# Altium footprint library Amin-Library.PcbLib: 601 footprints (part 4 of 38)
Each footprint in its own frame and in the unit in brackets; x right, y up, seen from the top. Pads: shape width x height; smd on the part's side, far side on the other; paste and mask are expansions set on the pad; w line width, h text height; cw(c..) or ccw(c..) is an arc to the next point about the centre after c.
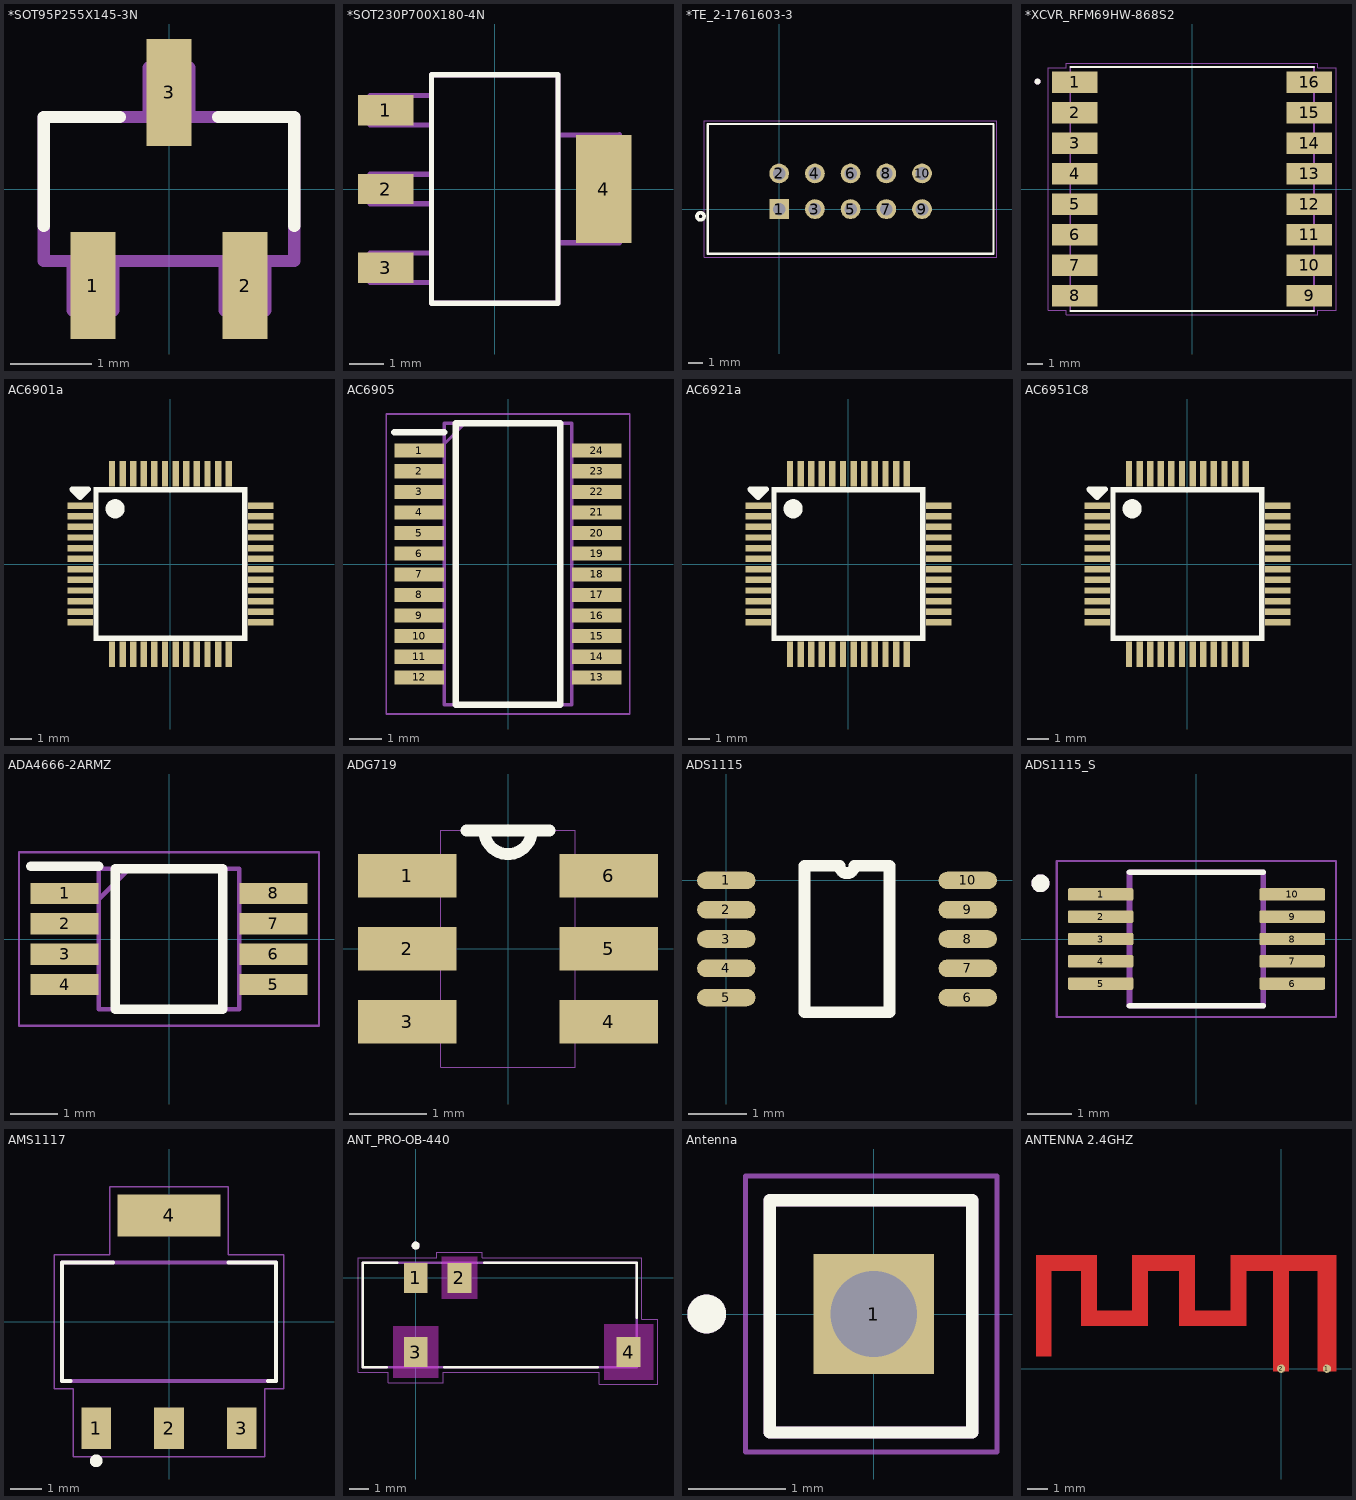
[diagram p3: the footprints below, top view; thin cyan lines are the x and y axes]

## *SOT95P255X145-3N [mil]
pads (3):
  rect 22x52 smd: 1(-37,-47) 2(37,-47) 3(0,47)
Top Overlay:
  lines w6: -61,-18 -61,35 -24,35 ; 24,35 61,35 61,-18
Mechanical 4:
  lines w6: -61,-35 -61,35 ; -61,-35 61,-35 ; -61,-35 -61,35 ; -61,-35 61,-35 ; -61,35 61,35 ; -61,35 61,35 ; -47,-59 -27,-59 ; -47,-59 -47,-35 ; -47,-59 -27,-59 ; -47,-59 -47,-35 ; -47,-35 -27,-35 ; -47,-35 -27,-35 ; -27,-59 -27,-35 ; -27,-59 -27,-35 ; -10,35 -10,59 ; -10,35 10,35 ; -10,35 -10,59 ; -10,35 10,35 ; -10,59 10,59 ; -10,59 10,59 ; 10,35 10,59 ; 10,35 10,59 ; 27,-59 47,-59 ; 27,-59 27,-35 ; 27,-59 47,-59 ; 27,-59 27,-35 ; 27,-35 47,-35 ; 27,-35 47,-35 ; 47,-59 47,-35 ; 47,-59 47,-35 ; 61,-35 61,35 ; 61,-35 61,35
3D body "CircuitWorks-SOT-23.step": height 43.81, standoff 0.5, extent -59.06,-44.21 59.06,54.21

## *SOT230P700X180-4N [mil]
pads (4):
  rect 64x35 smd: 1(-126,91) 2(-126,0) 3(-126,-91)
  rect 64x125 smd: 4(126,0)
Top Overlay:
  lines w6: -73,-132 73,-132 73,132 -73,132 -73,-132
Mechanical 4:
  lines w6: -144,-108 -144,-74 ; -144,-108 -73,-108 ; -144,-108 -144,-74 ; -144,-108 -73,-108 ; -144,-74 -73,-74 ; -144,-74 -73,-74 ; -144,-17 -144,17 ; -144,-17 -73,-17 ; -144,-17 -144,17 ; -144,-17 -73,-17 ; -144,17 -73,17 ; -144,17 -73,17 ; -144,74 -144,108 ; -144,74 -73,74 ; -144,74 -144,108 ; -144,74 -73,74 ; -144,108 -73,108 ; -144,108 -73,108 ; -73,-132 73,-132 ; -73,-132 -73,132 ; -73,-132 73,-132 ; -73,-132 -73,132 ; -73,-108 -73,-74 ; -73,-108 -73,-74 ; -73,-17 -73,17 ; -73,-17 -73,17 ; -73,74 -73,108 ; -73,74 -73,108 ; -73,132 73,132 ; -73,132 73,132 ; 73,-132 73,132 ; 73,-132 73,132 ; 73,-62 73,62 ; 73,-62 144,-62 ; 73,-62 73,62 ; 73,-62 144,-62 ; 73,62 144,63 ; 73,62 144,63 ; 144,-62 144,63 ; 144,-62 144,63
3D body "AMS1117-3.3--3DModel-STEP-56544.STEP": height 77.48, standoff 6.26, extent -127.78,-128 147.78,128

## *TE_2-1761603-3 [mm]
pads (10):
  rect 1.408x1.408 hole 0.9: 1(0,0)
  round 1.408 hole 0.9: 2(0,2.54) 3(2.54,0) 4(2.54,2.54) 5(5.08,0) 6(5.08,2.54) 7(7.62,0) 8(7.62,2.54) 9(10.16,0) 10(10.16,2.54)
Top Overlay:
  circle w0.254: c-5.588,-0.508 r0.254
  lines w0.152: -5.08,-3.175 -5.08,6.045 15.24,6.045 15.24,-3.175 -5.08,-3.175
Mechanical 16:
  lines w0.05: -5.33,-3.43 -5.33,6.295 15.49,6.295 15.49,-3.43 -5.33,-3.43

## *XCVR_RFM69HW-868S2 [mm]
pads (16):
  rect 3x1.4 smd: 1(-7.7,7) 2(-7.7,5) 3(-7.7,3) 4(-7.7,1) 5(-7.7,-1) 6(-7.7,-3) 7(-7.7,-5) 8(-7.7,-7) 9(7.7,-7) 10(7.7,-5) 11(7.7,-3) 12(7.7,-1) 13(7.7,1) 14(7.7,3) 15(7.7,5) 16(7.7,7)
Top Overlay:
  circle w0.2: c-10.15,7.05 r0.1
  lines w0.127: -8,-8 8,-8 ; -8,8 8,8
Mechanical 4:
  circle w0.2: c-10.15,7.05 r0.1
  circle w0.2: c-10.15,7.05 r0.1
  lines w0.127: -8,-8 -8,8 ; -8,-8 8,-8 ; -8,-8 -8,8 ; -8,-8 8,-8 ; -8,8 8,8 ; -8,8 8,8 ; 8,-8 8,8 ; 8,-8 8,8
Mechanical 16:
  lines w0.05: -9.45,-7.95 -8.25,-7.95 -8.25,-8.25 8.25,-8.25 8.25,-7.95 9.45,-7.95 9.45,7.95 8.25,7.95 8.25,8.25 -8.25,8.25 -8.25,7.95 -9.45,7.95 -9.45,-7.95

## AC6901a [mm]
height 5.33
pads (48):
  rect 1.2x0.3 smd mask+0.051: 1(-4.25,2.75) 2(-4.25,2.25) 3(-4.25,1.75) 4(-4.25,1.25) 5(-4.25,0.75) 6(-4.25,0.25) 7(-4.25,-0.25) 8(-4.25,-0.75) 9(-4.25,-1.25) 10(-4.25,-1.75) 11(-4.25,-2.25) 12(-4.25,-2.75) 25(4.25,-2.75) 26(4.25,-2.25) 27(4.25,-1.75) 28(4.25,-1.25) 29(4.25,-0.75) 30(4.25,-0.25) 31(4.25,0.25) 32(4.25,0.75) 33(4.25,1.25) 34(4.25,1.75) 35(4.25,2.25) 36(4.25,2.75)
  rect 0.3x1.2 smd mask+0.051: 13(-2.75,-4.25) 14(-2.25,-4.25) 15(-1.75,-4.25) 16(-1.25,-4.25) 17(-0.75,-4.25) 18(-0.25,-4.25) 19(0.25,-4.25) 20(0.75,-4.25) 21(1.25,-4.25) 22(1.75,-4.25) 23(2.25,-4.25) 24(2.75,-4.25) 37(2.75,4.25) 38(2.25,4.25) 39(1.75,4.25) 40(1.25,4.25) 41(0.75,4.25) 42(0.25,4.25) 43(-0.25,4.25) 44(-0.75,4.25) 45(-1.25,4.25) 46(-1.75,4.25) 47(-2.25,4.25) 48(-2.75,4.25)
Top Overlay:
  circle w0.6: c-2.6,2.6 r0.15
  rectangle: -3.175,3.373 3.627,3.627
  region: 3.627,2.992 3.627,3.627 3.373,3.627 3.373,2.992
  region: -3.373,-3.627 -3.373,3.627 -3.627,3.627 -3.627,-3.627
  region: -2.992,3.627 -3.627,3.627 -3.627,3.373 -2.992,3.373
  region: -3.627,-2.992 -3.627,-3.627 -3.373,-3.627 -3.373,-2.992
  region: -2.992,-3.373 -3.627,-3.373 -3.627,-3.627 -2.992,-3.627
  region: 3.373,3.373 3.373,-3.627 3.627,-3.627 3.627,3.373
  rectangle: -3.373,-3.627 3.627,-3.373
  region: -4.25,3.131 -3.869,3.512 -4.631,3.512
  lines w0.254: -3.5,-3.119 -3.5,-3.5 -3.119,-3.5 ; -3.5,3.119 -3.5,3.5 -3.119,3.5 ; 3.119,-3.5 3.5,-3.5 3.5,-3.119 ; 3.119,3.5 3.5,3.5 3.5,3.119 ; -4.631,3.512 -4.25,3.512 -3.869,3.512 -4.25,3.131 -4.631,3.512
3D body "LQFP48.STEP": height 1.5, standoff 0, extent -4.5,-4.5 4.5,4.5

## AC6905 [mm]
pads (24):
  rect 1.535x0.435 smd: 1(-2.732,3.492) 2(-2.732,2.858) 3(-2.732,2.222) 4(-2.732,1.588) 5(-2.732,0.952) 6(-2.732,0.318) 7(-2.732,-0.318) 8(-2.732,-0.952) 9(-2.732,-1.588) 10(-2.732,-2.222) 11(-2.732,-2.858) 12(-2.732,-3.492) 13(2.732,-3.492) 14(2.732,-2.858) 15(2.732,-2.222) 16(2.732,-1.588) 17(2.732,-0.952) 18(2.732,-0.318) 19(2.732,0.318) 20(2.732,0.952) 21(2.732,1.588) 22(2.732,2.222) 23(2.732,2.858) 24(2.732,3.492)
Top Overlay:
  lines w0.2: -3.5,4.06 -1.965,4.06 ; -1.615,-4.331 1.615,-4.331 1.615,4.331 -1.615,4.331 -1.615,-4.331
Mechanical 13:
  lines w0.1: -1.965,3.696 -1.33,4.331 ; -1.965,-4.331 1.965,-4.331 1.965,4.331 -1.965,4.331 -1.965,-4.331
Mechanical 15:
  lines w0.05: -3.75,-4.619 3.75,-4.619 3.75,4.619 -3.75,4.619 -3.75,-4.619
3D body "AC6905A.stp": height 1.8, standoff 0, extent -3.01,-4.331 3.01,4.331

## AC6921a [mm]
height 5.33
pads (48):
  rect 1.2x0.3 smd mask+0.051: 1(-4.25,2.75) 2(-4.25,2.25) 3(-4.25,1.75) 4(-4.25,1.25) 5(-4.25,0.75) 6(-4.25,0.25) 7(-4.25,-0.25) 8(-4.25,-0.75) 9(-4.25,-1.25) 10(-4.25,-1.75) 11(-4.25,-2.25) 12(-4.25,-2.75) 25(4.25,-2.75) 26(4.25,-2.25) 27(4.25,-1.75) 28(4.25,-1.25) 29(4.25,-0.75) 30(4.25,-0.25) 31(4.25,0.25) 32(4.25,0.75) 33(4.25,1.25) 34(4.25,1.75) 35(4.25,2.25) 36(4.25,2.75)
  rect 0.3x1.2 smd mask+0.051: 13(-2.75,-4.25) 14(-2.25,-4.25) 15(-1.75,-4.25) 16(-1.25,-4.25) 17(-0.75,-4.25) 18(-0.25,-4.25) 19(0.25,-4.25) 20(0.75,-4.25) 21(1.25,-4.25) 22(1.75,-4.25) 23(2.25,-4.25) 24(2.75,-4.25) 37(2.75,4.25) 38(2.25,4.25) 39(1.75,4.25) 40(1.25,4.25) 41(0.75,4.25) 42(0.25,4.25) 43(-0.25,4.25) 44(-0.75,4.25) 45(-1.25,4.25) 46(-1.75,4.25) 47(-2.25,4.25) 48(-2.75,4.25)
Top Overlay:
  circle w0.6: c-2.6,2.6 r0.15
  rectangle: -3.373,-3.627 3.627,-3.373
  region: 3.373,3.373 3.373,-3.627 3.627,-3.627 3.627,3.373
  region: -2.992,-3.373 -3.627,-3.373 -3.627,-3.627 -2.992,-3.627
  region: -3.627,-2.992 -3.627,-3.627 -3.373,-3.627 -3.373,-2.992
  region: -2.992,3.627 -3.627,3.627 -3.627,3.373 -2.992,3.373
  region: -3.373,-3.627 -3.373,3.627 -3.627,3.627 -3.627,-3.627
  region: 3.627,2.992 3.627,3.627 3.373,3.627 3.373,2.992
  rectangle: -3.175,3.373 3.627,3.627
  region: -4.25,3.131 -3.869,3.512 -4.631,3.512
  lines w0.254: -3.5,-3.119 -3.5,-3.5 -3.119,-3.5 ; -3.5,3.119 -3.5,3.5 -3.119,3.5 ; 3.119,-3.5 3.5,-3.5 3.5,-3.119 ; 3.119,3.5 3.5,3.5 3.5,3.119 ; -4.631,3.512 -4.25,3.131 -3.869,3.512 -4.25,3.512 -4.631,3.512
3D body "LQFP48.STEP": height 1.5, standoff 0, extent -4.5,-4.5 4.5,4.5

## AC6951C8 [mm] "LQFP48"
height 5.33
pads (48):
  rect 1.2x0.3 smd mask+0.051: 1(-4.25,2.75) 2(-4.25,2.25) 3(-4.25,1.75) 4(-4.25,1.25) 5(-4.25,0.75) 6(-4.25,0.25) 7(-4.25,-0.25) 8(-4.25,-0.75) 9(-4.25,-1.25) 10(-4.25,-1.75) 11(-4.25,-2.25) 12(-4.25,-2.75) 25(4.25,-2.75) 26(4.25,-2.25) 27(4.25,-1.75) 28(4.25,-1.25) 29(4.25,-0.75) 30(4.25,-0.25) 31(4.25,0.25) 32(4.25,0.75) 33(4.25,1.25) 34(4.25,1.75) 35(4.25,2.25) 36(4.25,2.75)
  rect 0.3x1.2 smd mask+0.051: 13(-2.75,-4.25) 14(-2.25,-4.25) 15(-1.75,-4.25) 16(-1.25,-4.25) 17(-0.75,-4.25) 18(-0.25,-4.25) 19(0.25,-4.25) 20(0.75,-4.25) 21(1.25,-4.25) 22(1.75,-4.25) 23(2.25,-4.25) 24(2.75,-4.25) 37(2.75,4.25) 38(2.25,4.25) 39(1.75,4.25) 40(1.25,4.25) 41(0.75,4.25) 42(0.25,4.25) 43(-0.25,4.25) 44(-0.75,4.25) 45(-1.25,4.25) 46(-1.75,4.25) 47(-2.25,4.25) 48(-2.75,4.25)
Top Overlay:
  circle w0.6: c-2.6,2.6 r0.15
  rectangle: -3.175,3.373 3.627,3.627
  region: 3.627,2.992 3.627,3.627 3.373,3.627 3.373,2.992
  region: -3.373,-3.627 -3.373,3.627 -3.627,3.627 -3.627,-3.627
  region: -2.992,3.627 -3.627,3.627 -3.627,3.373 -2.992,3.373
  region: -3.627,-2.992 -3.627,-3.627 -3.373,-3.627 -3.373,-2.992
  region: -2.992,-3.373 -3.627,-3.373 -3.627,-3.627 -2.992,-3.627
  region: 3.373,3.373 3.373,-3.627 3.627,-3.627 3.627,3.373
  rectangle: -3.373,-3.627 3.627,-3.373
  region: -4.25,3.131 -3.869,3.512 -4.631,3.512
  lines w0.254: -3.5,-3.119 -3.5,-3.5 -3.119,-3.5 ; -3.5,3.119 -3.5,3.5 -3.119,3.5 ; 3.119,-3.5 3.5,-3.5 3.5,-3.119 ; 3.119,3.5 3.5,3.5 3.5,3.119 ; -4.631,3.512 -4.25,3.512 -3.869,3.512 -4.25,3.131 -4.631,3.512
3D body "LQFP48.STEP": height 1.5, standoff 0, extent -4.5,-4.5 4.5,4.5

## ADA4666-2ARMZ [mm]
pads (8):
  rect 1.45x0.45 smd: 1(-2.225,0.975) 2(-2.225,0.325) 3(-2.225,-0.325) 4(-2.225,-0.975) 5(2.225,-0.975) 6(2.225,-0.325) 7(2.225,0.325) 8(2.225,0.975)
Top Overlay:
  lines w0.2: -2.95,1.55 -1.5,1.55 ; -1.15,-1.5 1.15,-1.5 1.15,1.5 -1.15,1.5 -1.15,-1.5
Mechanical 13:
  lines w0.1: -1.5,0.85 -0.85,1.5 ; -1.5,-1.5 1.5,-1.5 1.5,1.5 -1.5,1.5 -1.5,-1.5
Mechanical 15:
  lines w0.05: -3.2,-1.85 3.2,-1.85 3.2,1.85 -3.2,1.85 -3.2,-1.85
3D body "ADA4666-2ARMZ.stp": height 1.1, standoff 0, extent -2.45,-1.5 2.45,1.5

## ADG719 [mil]
pads (6):
  rect 50x22 smd: 1(-51,37) 2(-51,0) 3(-51,-37) 4(51,-37) 5(51,0) 6(51,37)
Top Overlay:
  lines w6: -21,60 -12,60 ; 21,60 12,60 ; -12,60 ccw(c0,60) 12,60 ; -12,60 12,60
Mechanical 4:
  lines w0: -59,-47 -59,-28 ; -59,-47 -34,-47 ; -59,-47 -59,-28 ; -59,-47 -34,-47 ; -59,-28 -34,-28 ; -59,-28 -34,-28 ; -59,-10 -59,10 ; -59,-10 -34,-10 ; -59,-10 -59,10 ; -59,-10 -34,-10 ; -59,10 -34,10 ; -59,10 -34,10 ; -59,28 -59,47 ; -59,28 -34,28 ; -59,28 -59,47 ; -59,28 -34,28 ; -59,47 -34,47 ; -59,47 -34,47 ; -34,-60 34,-60 ; -34,-60 -34,-47 ; -34,-60 34,-60 ; -34,-60 -34,-47 ; -34,-47 -34,-28 ; -34,-47 -34,-28 ; -34,-28 -34,-10 ; -34,-28 -34,-10 ; -34,-10 -34,10 ; -34,-10 -34,10 ; -34,10 -34,28 ; -34,10 -34,28 ; -34,28 -34,47 ; -34,28 -34,47 ; -34,47 -34,60 ; -34,47 -34,60 ; -34,60 -12,60 ; -34,60 -12,60 ; -12,60 ccw(c0,60) 12,60 ; -12,60 ccw(c0,60) 12,60 ; -12,60 12,60 ; -12,60 12,60 ; 12,60 34,60 ; 12,60 34,60 ; 34,-60 34,-47 ; 34,-60 34,-47 ; 34,-47 34,-28 ; 34,-47 59,-47 ; 34,-47 34,-28 ; 34,-47 59,-47 ; 34,-28 34,-10 ; 34,-28 59,-28 ; 34,-28 34,-10 ; 34,-28 59,-28 ; 34,-10 34,10 ; 34,-10 59,-10 ; 34,-10 34,10 ; 34,-10 59,-10 ; 34,10 34,28 ; 34,10 59,10 ; 34,10 34,28 ; 34,10 59,10 ; 34,28 34,47 ; 34,28 59,28 ; 34,28 34,47 ; 34,28 59,28 ; 34,47 34,60 ; 34,47 59,47 ; 34,47 34,60 ; 34,47 59,47 ; 59,-47 59,-28 ; 59,-47 59,-28 ; 59,-10 59,10 ; 59,-10 59,10 ; 59,28 59,47 ; 59,28 59,47
3D body "User Library-SOT23-6-2.STEP": height 57.09, standoff 0, extent -55.11,-57.09 55.13,57.08

## ADS1115 [mm] "MSOP 10 pitch 0.5mm"
pads (10):
  oval 1x0.3 smd: 1(0,0) 2(0,-0.5) 3(0,-1) 4(0,-1.5) 5(0,-2) 6(4.125,-2) 7(4.125,-1.5) 8(4.125,-1) 9(4.125,-0.5) 10(4.125,0)
Top Overlay:
  lines w0.2: 1.335,-2.25 2.79,-2.25 2.79,0.25 2.187,0.25 cw(c2.063,0.25) 1.938,0.25 1.335,0.25 1.335,-2.25

## ADS1115_S [mm]
pads (10):
  rrect25% 1.47x0.28 smd: 1(-2.15,1) 2(-2.15,0.5) 3(-2.15,0) 4(-2.15,-0.5) 5(-2.15,-1) 6(2.15,-1) 7(2.15,-0.5) 8(2.15,0) 9(2.15,0.5) 10(2.15,1)
Top Overlay:
  circle w0.2: c-3.5,1.25 r0.1
  lines w0.127: -1.5,-1.5 1.5,-1.5 ; -1.5,1.5 1.5,1.5
Mechanical 13:
  circle w0.2: c-3.5,1.25 r0.1
  lines w0.127: -1.5,-1.5 -1.5,1.5 1.5,1.5 1.5,-1.5 -1.5,-1.5
Mechanical 15:
  lines w0.05: -3.135,-1.75 -3.135,1.75 3.135,1.75 3.135,-1.75 -3.135,-1.75
3D body "ads1115idgsr.stp": height 1.1, standoff 0, extent -2.606,-1.5 2.469,1.5

## AMS1117 [mm]
pads (4):
  rect 0.93x1.31 smd: 1(-2.29,-3.345) 2(0,-3.345) 3(2.29,-3.345)
  rect 3.24x1.31 smd: 4(0,3.345)
Top Overlay:
  circle w0.2: c-2.29,-4.373 r0.1
  lines w0.127: -3.1,-1.86 -3.36,-1.86 -3.36,1.86 -1.76,1.86 ; 1.87,1.86 3.36,1.86 3.36,-1.86 3.11,-1.86
Mechanical 4:
  lines w0.127: -3.36,-1.86 3.36,-1.86 ; -3.36,-1.86 -3.36,1.86 ; -3.36,-1.86 3.36,-1.86 ; -3.36,-1.86 -3.36,1.86 ; -3.36,1.86 3.36,1.86 ; -3.36,1.86 3.36,1.86 ; 3.36,-1.86 3.36,1.86 ; 3.36,-1.86 3.36,1.86
Mechanical 16:
  lines w0.05: -3.61,-2.11 -3.01,-2.11 -3.01,-4.25 3.01,-4.25 3.01,-2.11 3.61,-2.11 3.61,2.11 1.87,2.11 1.87,4.25 -1.87,4.25 -1.87,2.11 -3.61,2.11 -3.61,-2.11
3D body "User Library-AMS1117.step": height 1.87, standoff 0.01, extent -3.198,-3.5 3.302,3.5

## ANT_PRO-OB-440 [mm]
pads (4):
  rect 1.2x1.5 smd: 1(0,0) 2(2.2,0) 3(0,-3.73) 4(10.7,-3.73)
Top Overlay:
  circle w0.2: c0,1.62 r0.1
  lines w0.127: -1.445,-4.48 -2.65,-4.48 -2.65,0.75 -0.92,0.75 ; 1.445,-4.48 9.155,-4.48 ; 3.45,0.75 11.1,0.75 11.1,-2.01
Keep-Out Layer:
  region: 3.1,-1.05 1.3,-1.05 1.3,1.05 3.1,1.05
  region: 3.1,-1.05 1.3,-1.05 1.3,1.05 3.1,1.05
  region: 3.1,-1.05 1.3,-1.05 1.3,1.05 3.1,1.05
  region: 11.925,-5.13 9.475,-5.13 9.475,-2.33 11.925,-2.33
  region: 11.925,-5.13 9.475,-5.13 9.475,-2.33 11.925,-2.33
  region: 11.925,-5.13 9.475,-5.13 9.475,-2.33 11.925,-2.33
  region: 1.125,-5.03 -1.125,-5.03 -1.125,-2.43 1.125,-2.43
  region: 1.125,-5.03 -1.125,-5.03 -1.125,-2.43 1.125,-2.43
  region: 1.125,-5.03 -1.125,-5.03 -1.125,-2.43 1.125,-2.43
Mechanical 13:
  circle w0.2: c0,1.62 r0.1
  lines w0.127: -2.65,-4.48 11.1,-4.48 11.1,0.75 -2.65,0.75 -2.65,-4.48
Mechanical 15:
  lines w0.05: -2.9,-4.73 -2.9,1 1.05,1 1.05,1.3 3.35,1.3 3.35,1 11.35,1 11.35,-2.08 12.175,-2.08 12.175,-5.35 9.225,-5.35 9.225,-4.73 1.375,-4.73 1.375,-5.28 -1.375,-5.28 -1.375,-4.73 -2.9,-4.73
3D body "PRO-OB-440--3DModel-STEP-1.STEP": height 3.54, standoff 0.01, extent -2.684,-4.48 11.066,0.75

## Antenna [mm]
pads (1):
  rect 1.24x1.24 hole 0.89: 1(0,0)
Top Overlay:
  circle w0.2: c-1.72,0 r0.1
  lines w0.127: -1.07,-1.22 -1.07,1.17 1.016,1.17 1.016,-1.22 -1.07,-1.22
Mechanical 4:
  circle w0.2: c-1.72,0 r0.1
  circle w0.2: c-1.72,0 r0.1
  lines w0.127: -1.07,-1.17 -1.07,1.17 ; 1.016,-1.17 1.016,1.17 -1.07,1.17 ; -1.07,1.17 0.989,1.17 1.016,1.143 1.016,-1.22 -1.07,-1.22 -1.07,1.17
Mechanical 16:
  lines w0.05: -1.32,-1.42 -1.32,1.42 1.27,1.42 1.27,-1.42 -1.32,-1.42

## ANTENNA 2.4GHZ [mm] "ESP32 ANTENNA"
pads (2):
  round 0.4 smd paste-0.2: 1(2.237,0) 2(0,0)
Top Layer:
  region: -0.377,-0.114 0.377,-0.114 0.377,4.786 1.796,4.786 1.796,-0.114 2.677,-0.114 2.677,5.54 -2.45,5.54 -2.45,2.84 -4.207,2.84 -4.207,5.54 -7.261,5.54 -7.261,2.84 -9.007,2.84 -9.007,5.54 -11.961,5.54 -11.961,0.612 -11.207,0.612 -11.207,4.786 -9.761,4.786 -9.761,2.086 -6.507,2.086 -6.507,4.786 -4.961,4.786 -4.961,2.086 -1.696,2.086 -1.696,4.786 -0.377,4.786